# EAGLE library part IC_DFN-6+G (library dp_devices.v6)
Universal chip with DFN-6 package
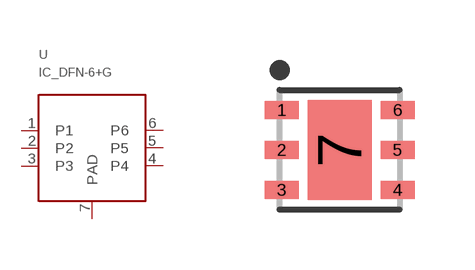
[diagram p197: symbol with the pads of DFN-6_3X3; footprint DFN-6_3X3]

Designator prefix U

## IC_DFN-6+G  [DFN-6_3X3]
1  P1  pas
2  P2  pas
3  P3  pas
4  P4  pas
5  P5  pas
6  P6  pas
7  PAD  pas

## Footprint DFN-6_3X3 (pad centres in mm)
smd 0.85 x 0.45: 1 -1.45,1; 2 -1.45,0; 3 -1.45,-1; 4 1.45,-1; 5 1.45,0; 6 1.45,1
smd 1.6 x 2.5: 7 0,0